# Altium footprint library Diode$.PcbLib: 98 footprints (part 7 of 7)
Each footprint in its own frame and in the unit in brackets; x right, y up, seen from the top. Pads: shape width x height; smd on the part's side, far side on the other; paste and mask are expansions set on the pad; w line width, h text height; cw(c..) or ccw(c..) is an arc to the next point about the centre after c.
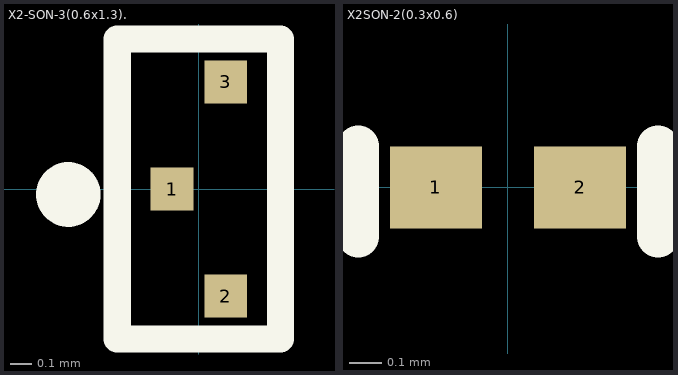
[diagram p6: the footprints below, top view; thin cyan lines are the x and y axes]

## X2-SON-3(0.6x1.3). [mm]
pads (3):
  rect 0.2x0.2 smd paste+0 mask+0.05: 1(-0.125,0) 2(0.125,-0.5) 3(0.125,0.5)
Top Overlay:
  circle w0.2: c-0.61,-0.025 r0.051
  lines w0.127: 0.381,0.262 0.381,0.7 -0.381,0.7 -0.381,-0.7 0.381,-0.7 0.381,-0.315 0.381,0.315
3D body "3D_PCB1_2024-06-05.step": height 0.4, standoff 0, extent -0.31,-0.65 0.31,0.65

## X2SON-2(0.3x0.6) [mm]
pads (2):
  rect 0.28x0.25 smd paste+0 mask+0.05: 1(-0.22,0) 2(0.22,0)
Top Overlay:
  lines w0.127: -0.457,-0.15 -0.457,0.125 ; 0.457,-0.15 0.457,0.125
3D body "ESD451DPLR.step": height 0.32, standoff 0, extent -0.3,-0.15 0.3,0.15